# Altium footprint library PMP41115.PcbLib: 53 footprints (part 2 of 4)
Each footprint in its own frame and in the unit in brackets; x right, y up, seen from the top. Pads: shape width x height; smd on the part's side, far side on the other; paste and mask are expansions set on the pad; w line width, h text height; cw(c..) or ccw(c..) is an arc to the next point about the centre after c.
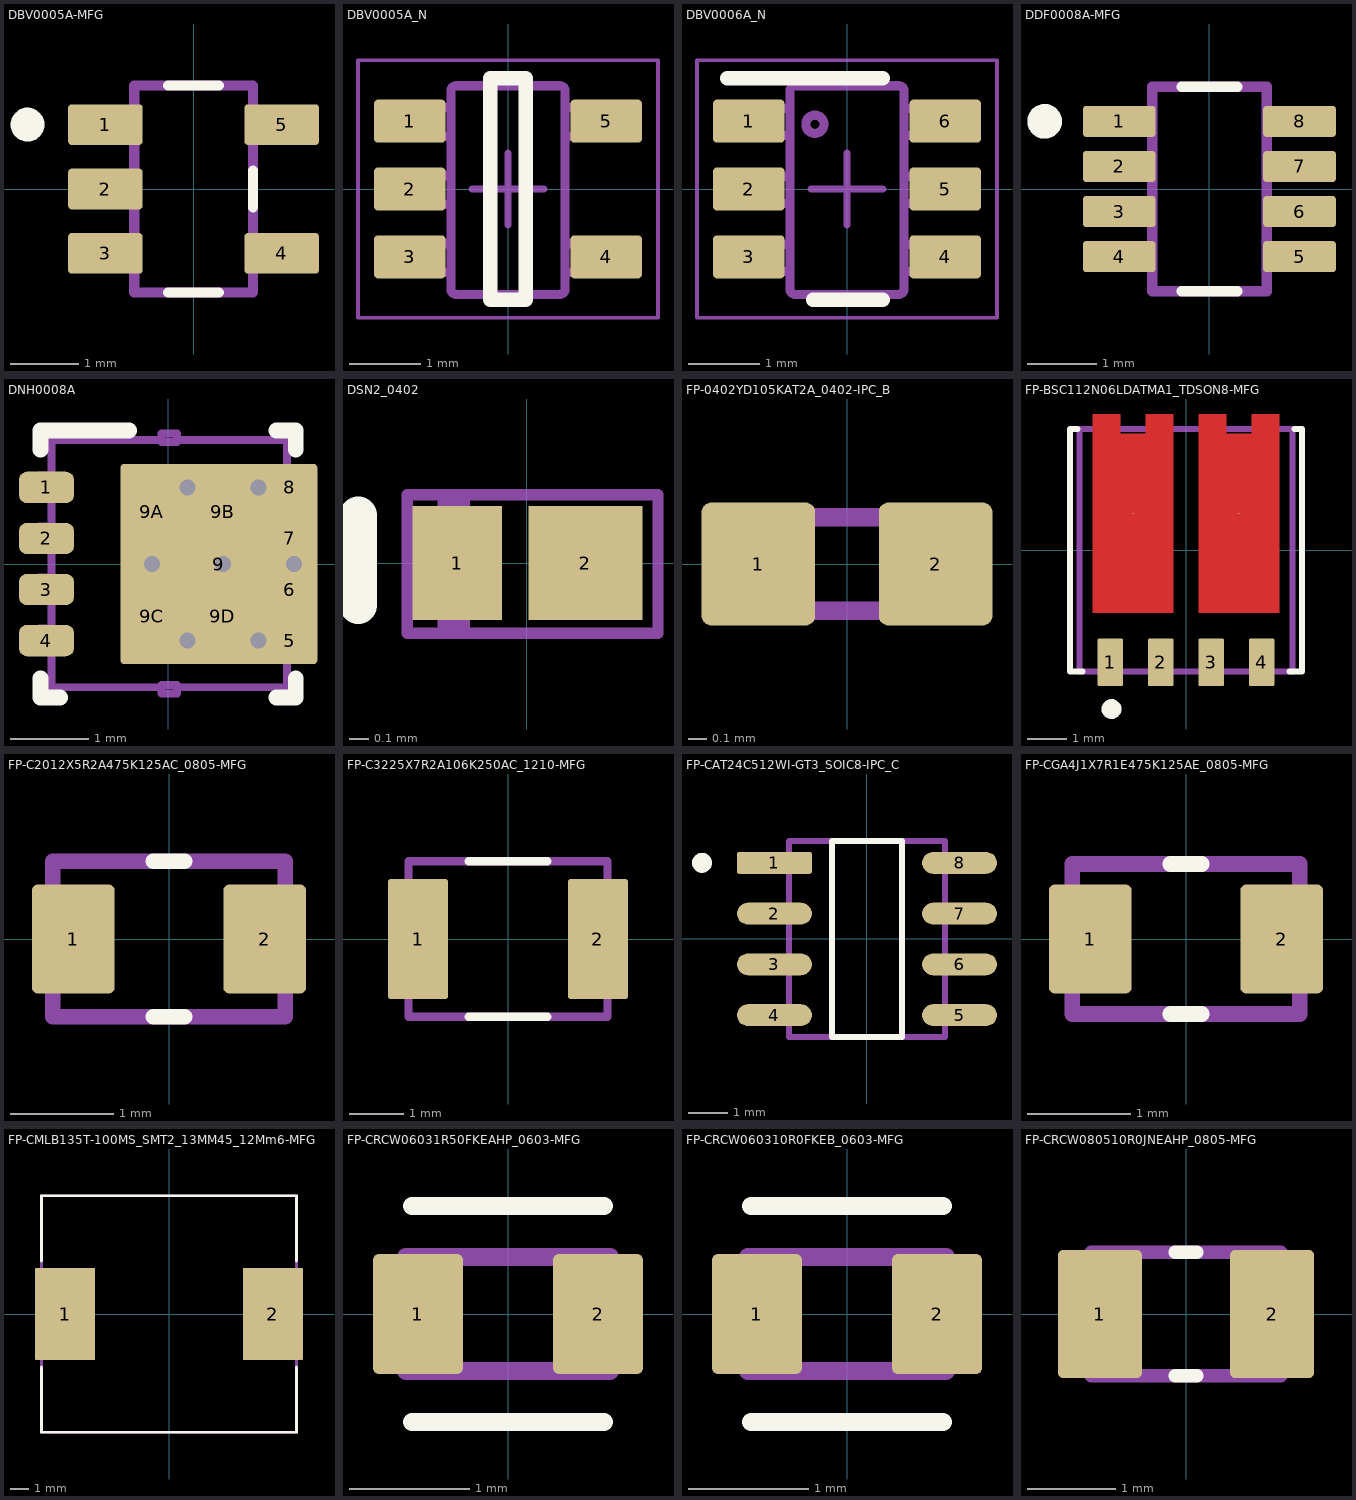
[diagram p1: the footprints below, top view; thin cyan lines are the x and y axes]

## DBV0005A-MFG [mm]
pads (5):
  rrect17% 1.1x0.6 smd paste+0 mask+0: 1(-1.3,0.95) 2(-1.3,0) 3(-1.3,-0.95) 4(1.3,-0.95) 5(1.3,0.95)
Top Overlay:
  circle w0.25: c-2.45,0.95 r0.125
  lines w0.15: -0.375,-1.525 0.375,-1.525 ; -0.375,1.525 0.375,1.525 ; 0.875,-0.275 0.875,0.275
Mechanical 5:
  lines w0.15: -0.875,-1.525 -0.875,1.525 0.875,1.525 0.875,-1.525 -0.875,-1.525
  text ".Designator" at 0.05,0.217 h0.5
3D body "IC_TPS7A2450DBVR_SOT23-5.STEP": height 0.25, standoff 0, extent -1.95,-1.775 1.95,1.775

## DBV0005A_N [mm] "SOT23, 5-Leads, Body 2.9x1.6mm, Pitch 0.95mm, Lead Span 2.8mm, IPC Medium Density"
height 1.45
pads (5):
  rrect17% 1x0.6 smd: 1(-1.375,0.95) 2(-1.375,0) 3(-1.375,-0.95) 4(1.375,-0.95) 5(1.375,0.95)
Top Overlay:
  lines w0.2: -0.25,-1.55 0.25,-1.55 0.25,1.55 -0.25,1.55 -0.25,-1.55
Mechanical 5:
  lines w0.127: -0.801,1.371 cw(c-0.725,1.37) -0.725,1.446 ; -0.801,1.37 -0.801,-1.399 -0.801,-1.4 ccw(c-0.725,-1.399) -0.725,-1.475 ; -0.801,1.37 -0.801,1.371 ; -0.725,-1.475 -0.725,-1.475 ; -0.725,-1.475 0.723,-1.475 0.724,-1.475 ccw(c0.723,-1.399) 0.799,-1.4 0.799,-1.399 0.799,1.37 ; -0.725,1.446 0.723,1.446 0.724,1.446 cw(c0.723,1.37) 0.799,1.371 ; -0.725,1.446 -0.725,1.446 ; 0.799,1.37 0.799,1.371 ; -1.423,-1.167 -1.199,-1.167 -1.105,-1.167 -1.088,-1.167 -0.835,-1.167 -0.801,-1.167 -0.801,-0.767 -0.835,-0.767 -1.088,-0.767 -1.105,-0.767 -1.199,-0.767 -1.423,-0.767 -1.423,-1.167 ; -1.423,-0.215 -1.199,-0.215 -1.105,-0.215 -1.088,-0.215 -0.835,-0.215 -0.801,-0.215 -0.801,0.186 -0.835,0.186 -1.088,0.186 -1.105,0.186 -1.199,0.186 -1.423,0.186 -1.423,-0.215 ; -1.423,0.738 -1.199,0.738 -1.105,0.738 -1.088,0.738 -0.835,0.738 -0.801,0.738 -0.801,1.138 -0.835,1.138 -1.088,1.138 -1.105,1.138 -1.199,1.138 -1.423,1.138 -1.423,0.738 ; 0.799,-1.167 0.799,-0.767 0.834,-0.767 1.087,-0.767 1.103,-0.767 1.198,-0.767 1.422,-0.767 1.422,-1.167 1.198,-1.167 1.103,-1.167 1.087,-1.167 0.834,-1.167 0.799,-1.167 ; 0.799,0.738 0.799,1.138 0.834,1.138 1.087,1.138 1.103,1.138 1.198,1.138 1.422,1.138 1.422,0.738 1.198,0.738 1.103,0.738 1.087,0.738 0.834,0.738 0.799,0.738
  text ".Designator" at -0.25,0.95 h0.51
Mechanical 15:
  lines w0.05: -2.1,-1.8 2.1,-1.8 2.1,1.8 -2.1,1.8 -2.1,-1.8
  lines w0.1: -0.5,0 0.5,0 ; 0,-0.5 0,0.5
3D body "DBV0005A.stp": height 1.09, standoff 0, extent -1.422,-1.461 1.423,1.46

## DBV0006A_N [mm] "SOT23, 6-Leads, Body 2.9x1.6mm, Pitch 0.95mm, Lead Span 2.8mm, IPC Medium Density"
height 1.45
pads (6):
  rrect17% 1x0.6 smd: 1(-1.375,0.95) 2(-1.375,0) 3(-1.375,-0.95) 4(1.375,-0.95) 5(1.375,0) 6(1.375,0.95)
Top Overlay:
  lines w0.2: -1.675,1.55 0.5,1.55 ; -0.475,-1.55 0.5,-1.55
Mechanical 5:
  lines w0.127: 0.724,-1.475 ccw(c0.723,-1.399) 0.8,-1.399 0.8,1.37 ccw(c0.723,1.37) 0.724,1.446 ; 0.723,-1.475 -0.724,-1.475 -0.725,-1.475 cw(c-0.724,-1.399) -0.801,-1.399 -0.801,1.37 cw(c-0.724,1.37) -0.725,1.446 -0.724,1.446 0.723,1.446 ; 0.723,-1.475 0.724,-1.475 ; 0.723,1.446 0.724,1.446 ; -1.423,-1.154 -1.423,-0.78 -1.206,-0.78 -1.113,-0.78 -1.081,-0.78 -0.828,-0.78 -0.801,-0.78 -0.801,-1.154 -0.828,-1.154 -1.081,-1.154 -1.113,-1.154 -1.206,-1.154 -1.423,-1.154 ; -1.423,-0.202 -1.423,0.173 -1.206,0.173 -1.113,0.173 -1.081,0.173 -0.828,0.173 -0.801,0.173 -0.801,-0.202 -0.828,-0.202 -1.081,-0.202 -1.113,-0.202 -1.206,-0.202 -1.423,-0.202 ; -1.423,0.751 -1.423,1.125 -1.206,1.125 -1.113,1.125 -1.081,1.125 -0.828,1.125 -0.801,1.125 -0.801,0.751 -0.828,0.751 -1.081,0.751 -1.113,0.751 -1.206,0.751 -1.423,0.751 ; -0.577,0.906 ccw(c-0.45,0.906) -0.323,0.906 ccw(c-0.45,0.906) -0.577,0.906 ; 0.8,-1.154 0.8,-0.78 0.827,-0.78 1.08,-0.78 1.112,-0.78 1.205,-0.78 1.422,-0.78 1.422,-1.154 1.205,-1.154 1.112,-1.154 1.08,-1.154 0.827,-1.154 0.8,-1.154 ; 0.8,-0.202 0.8,0.173 0.827,0.173 1.08,0.173 1.112,0.173 1.205,0.173 1.422,0.173 1.422,-0.202 1.205,-0.202 1.112,-0.202 1.08,-0.202 0.827,-0.202 0.8,-0.202 ; 0.8,0.751 0.8,1.125 0.827,1.125 1.08,1.125 1.112,1.125 1.205,1.125 1.422,1.125 1.422,0.751 1.205,0.751 1.112,0.751 1.08,0.751 0.827,0.751 0.8,0.751
  text ".Designator" at -0.075,0.925 h0.51
Mechanical 15:
  lines w0.05: -2.1,-1.8 -2.1,1.8 2.1,1.8 2.1,-1.8 -2.1,-1.8
  lines w0.1: -0.5,0 0.5,0 ; 0,-0.5 0,0.5
3D body "DBV0006A.stp": height 1.12, standoff 0, extent -1.422,-1.461 1.423,1.46

## DDF0008A-MFG [mm]
height 1.1
pads (8):
  rrect22% 1.05x0.45 smd paste+0 mask+0: 1(-1.3,0.975) 2(-1.3,0.325) 3(-1.3,-0.325) 4(-1.3,-0.975) 5(1.3,-0.975) 6(1.3,-0.325) 7(1.3,0.325) 8(1.3,0.975)
Top Overlay:
  circle w0.25: c-2.375,0.975 r0.125
  lines w0.15: -0.4,-1.475 0.4,-1.475 ; -0.4,1.475 0.4,1.475
Mechanical 5:
  lines w0.15: -0.825,-1.475 0.825,-1.475 0.825,1.475 -0.825,1.475 -0.825,-1.475
  text ".Designator" at 0,0 h0.5
3D body "IC_LM74502DDF_SOT23-8.STEP": height 0.25, standoff 0, extent -1.925,-1.725 1.925,1.725

## DNH0008A [mm] "VSONP-8"
height 0.9
pads (13):
  rrect50% 0.7x0.4 smd paste-0.05 mask-0.05: 1(-1.55,0.975) 2(-1.55,0.325) 3(-1.55,-0.325) 4(-1.55,-0.975) 5(1.55,-0.975) 6(1.55,-0.325) 7(1.55,0.325) 8(1.55,0.975)
  rrect4% 2.51x2.55 smd paste-1.5 mask-1.5: 9(0.645,0)
  rrect50% 0.705x1.125 on Top Paste: 9A(-0.208,0.662) 9B(0.697,0.662) 9C(-0.208,-0.663) 9D(0.697,-0.663)
via 0.245,0.975 diameter 0.5 hole 0.2
via 1.15,0.975 diameter 0.5 hole 0.2
via 1.15,-0.975 diameter 0.5 hole 0.2
via 0.245,-0.975 diameter 0.5 hole 0.2
via 0.697,0 diameter 0.5 hole 0.2
via -0.208,0 diameter 0.5 hole 0.2
via 1.602,0 diameter 0.5 hole 0.2
Top Overlay:
  lines w0.2: -1.625,-1.453 -1.625,-1.7 -1.378,-1.7 ; -1.625,1.453 -1.625,1.7 -0.5,1.7 ; 1.378,-1.7 1.625,-1.7 1.625,-1.453 ; 1.378,1.7 1.625,1.7 1.625,1.453
Top Solder:
  region: -0.56,-1.175 -0.56,-1.185 -0.552,-1.203 -0.538,-1.217 -0.52,-1.225 -0.51,-1.225 1.165,-1.225 1.175,-1.225 1.193,-1.217 1.207,-1.203 1.215,-1.185 1.215,-1.175 1.215,-1.125 1.8,-1.125 1.81,-1.125 1.828,-1.117 1.842,-1.103 1.85,-1.085 1.85,-1.075 1.85,-0.875 1.85,-0.865 1.842,-0.847 1.828,-0.833 1.81,-0.825 1.8,-0.825 1.215,-0.825 1.215,-0.475 1.8,-0.475 1.81,-0.475 1.828,-0.467 1.842,-0.453 1.85,-0.435 1.85,-0.425 1.85,-0.225 1.85,-0.215 1.842,-0.197 1.828,-0.183 1.81,-0.175 1.8,-0.175 1.215,-0.175 1.215,0.175 1.8,0.175 1.81,0.175 1.828,0.183 1.842,0.197 1.85,0.215 1.85,0.225 1.85,0.425 1.85,0.435 1.842,0.453 1.828,0.467 1.81,0.475 1.8,0.475 1.215,0.475 1.215,0.825 1.8,0.825 1.81,0.825 1.828,0.833 1.842,0.847 1.85,0.865 1.85,0.875 1.85,1.075 1.85,1.085 1.842,1.103 1.828,1.117 1.81,1.125 1.8,1.125 1.215,1.125 1.215,1.175 1.215,1.185 1.207,1.203 1.193,1.217 1.175,1.225 1.165,1.225 -0.51,1.225 -0.52,1.225 -0.538,1.217 -0.552,1.203 -0.56,1.185 -0.56,1.175
Mechanical 5:
  lines w0.1: -1.487,-1.119 -1.487,-1.569 -0.087,-1.569 ; -1.487,-0.819 -1.487,-0.469 ; -1.487,-0.169 -1.487,0.181 ; -1.487,0.481 -1.487,0.831 ; -1.487,1.131 -1.487,1.581 -0.087,1.581 ; 0.113,-1.569 1.513,-1.569 1.513,-1.119 ; 0.113,1.581 1.513,1.581 1.513,1.131 ; 1.513,-0.819 1.513,-0.469 ; 1.513,-0.169 1.513,0.181 ; 1.513,0.481 1.513,0.831 ; -1.637,-1.119 -1.637,-0.819 -1.461,-0.819 -1.461,-1.119 -1.637,-1.119 ; -1.637,-0.469 -1.637,-0.169 -1.461,-0.169 -1.461,-0.469 -1.637,-0.469 ; -1.637,0.181 -1.461,0.181 -1.461,0.481 -1.637,0.481 -1.637,0.181 ; -1.637,0.831 -1.637,1.131 -1.461,1.131 -1.461,0.831 -1.637,0.831 ; -0.087,-1.649 -0.087,-1.543 0.113,-1.543 0.113,-1.649 -0.087,-1.649 ; -0.087,1.554 0.113,1.554 0.113,1.661 -0.087,1.661 -0.087,1.554 ; 1.486,-1.119 1.486,-0.819 1.663,-0.819 1.663,-1.119 1.486,-1.119 ; 1.486,-0.469 1.486,-0.169 1.663,-0.169 1.663,-0.469 1.486,-0.469 ; 1.486,0.181 1.486,0.481 1.663,0.481 1.663,0.181 1.486,0.181 ; 1.486,0.831 1.486,1.131 1.663,1.131 1.663,0.831 1.486,0.831
  text ".Designator" at -0.725,-0.165 h0.38
3D body "DNH0008A.stp": height 0.91, standoff 0.01, extent -1.65,-1.655 1.65,1.655

## DSN2_0402 [mm] "ON SEMICONDUCTOR"
height 0.31
pads (2):
  rect 0.47x0.6 smd: 1(-0.367,0)
  rect 0.6x0.6 smd: 2(0.308,0)
Top Overlay:
  lines w0.2: -0.89,-0.22 -0.89,0.25
Mechanical 5:
  lines w0.06: -0.44,-0.36 -0.44,0.35 ; -0.38,-0.36 -0.38,0.35 ; -0.33,-0.36 -0.33,0.35 ; -0.63,-0.37 -0.63,0.36 0.69,0.36 0.69,-0.37 -0.63,-0.37
  text ".Designator" at -0.26,-0.13 h0.24
3D body: height 0.32, standoff 0.31, extent -0.349,-0.299 -0.221,0.299
3D body: height 0.31, standoff 0, extent -0.499,-0.299 0.499,0.299

## FP-0402YD105KAT2A_0402-IPC_B [mm]
height 4.8
pads (2):
  rrect16% 0.608x0.658 smd paste+0 mask+0: 1(-0.475,0) 2(0.475,0)
Mechanical 5:
  lines w0.1: -0.5,-0.25 0.5,-0.25 0.5,0.25 -0.5,0.25 -0.5,-0.25
  text ".Designator" at 0,0 h0.5
3D body "Cap_0402YD105KAT2A_0402.STEP": height 0.56, standoff 0, extent -0.5,-0.25 0.5,0.25

## FP-BSC112N06LDATMA1_TDSON8-MFG [mm]
pads (6):
  rrect15% 0.65x1.2 smd paste+0 mask+0: 1(-1.905,-2.825) 2(-0.635,-2.825) 3(0.635,-2.825) 4(1.905,-2.825)
  round 0.025 smd: 5-6(1.332,0.925) 7-8(-1.333,0.925)
Top Layer:
  region: 2.35,3.425 1.65,3.425 1.65,2.925 1.015,2.925 1.015,3.425 0.315,3.425 0.315,-1.575 2.35,-1.575
  region: -2.35,3.425 -1.65,3.425 -1.65,2.925 -1.015,2.925 -1.015,3.425 -0.315,3.425 -0.315,-1.575 -2.35,-1.575
Top Overlay:
  circle w0.25: c-1.875,-4 r0.125
  lines w0.15: -2.725,3.05 -2.925,3.05 -2.925,-3.05 -2.605,-3.05 ; 2.605,-3.05 2.925,-3.05 2.925,3.05 2.725,3.05
Mechanical 5:
  lines w0.15: -2.675,-3.05 2.675,-3.05 2.675,3.05 -2.675,3.05 -2.675,-3.05
  text ".Designator" at 0.05,0.217 h0.5
3D body "Trans_BSC112N06LDATMA1_TDSON8.STEP": height 0.25, standoff 0, extent -2.895,-3.525 2.895,3.525

## FP-C2012X5R2A475K125AC_0805-MFG [mm]
height 1
pads (2):
  rrect13% 0.8x1.05 smd paste+0 mask+0: 1(-0.925,0) 2(0.925,0)
Top Overlay:
  lines w0.15: -0.15,-0.75 0.15,-0.75 ; -0.15,0.75 0.15,0.75
Mechanical 5:
  lines w0.15: -1.125,-0.75 1.125,-0.75 1.125,0.75 -1.125,0.75 -1.125,-0.75
  text ".Designator" at 0.05,0.217 h0.5
3D body "Cap_C2012X5R2A475K125AC_0805.STEP": height 0.25, standoff 0, extent -1.425,-0.85 1.425,0.85

## FP-C3225X7R2A106K250AC_1210-MFG [mm]
height 4.8
pads (2):
  rrect9% 1.1x2.2 smd paste+0 mask+0: 1(-1.65,0) 2(1.65,0)
Top Overlay:
  lines w0.15: -0.725,-1.425 0.725,-1.425 ; -0.725,1.425 0.725,1.425
Mechanical 5:
  lines w0.15: -1.825,-1.425 1.825,-1.425 1.825,1.425 -1.825,1.425 -1.825,-1.425
  text ".Designator" at 0.05,0.217 h0.5
3D body "Cap_C3225X7R2A106K250AC_1210.STEP": height 2.85, standoff 0, extent -1.6,-1.25 1.6,1.25

## FP-CAT24C512WI-GT3_SOIC8-IPC_C [mm]
height 4.8
pads (8):
  rrect18% 1.874x0.545 smd paste+0 mask+0: 1(-2.316,1.905)
  rrect100% 1.874x0.545 smd paste+0 mask+0: 2(-2.316,0.635) 3(-2.316,-0.635) 4(-2.316,-1.905) 5(2.316,-1.905) 6(2.316,-0.635) 7(2.316,0.635) 8(2.316,1.905)
Top Overlay:
  circle w0.25: c-4.128,1.905 r0.125
  lines w0.15: -0.879,-2.45 0.879,-2.45 0.879,2.45 -0.879,2.45 -0.879,-2.45
Mechanical 5:
  lines w0.15: -1.95,-2.45 1.95,-2.45 1.95,2.45 -1.95,2.45 -1.95,-2.45
  text ".Designator" at 0.05,0.217 h0.5
3D body "IC_CAT24C512WI-GT3_SOIC8.STEP": height 0.25, standoff 0, extent -3.353,-2.55 3.353,2.55

## FP-CGA4J1X7R1E475K125AE_0805-MFG [mm]
height 4.8
pads (2):
  rrect13% 0.8x1.05 smd paste+0 mask+0: 1(-0.925,0) 2(0.925,0)
Top Overlay:
  lines w0.15: -0.15,-0.725 0.15,-0.725 ; -0.15,0.725 0.15,0.725
Mechanical 5:
  lines w0.15: -1.1,-0.725 1.1,-0.725 1.1,0.725 -1.1,0.725 -1.1,-0.725
  text ".Designator" at 0.05,0.217 h0.5
3D body "Cap_CGA4J1X7R1E475K125AE_0805.STEP": height 0.25, standoff 0, extent -1.425,-0.825 1.425,0.825

## FP-CMLB135T-100MS_SMT2_13MM45_12Mm6-MFG [mm]
height 4.8
pads (2):
  rrect3% 3.25x5 smd paste+0 mask+0: 1(-5.625,0) 2(5.625,0)
Top Overlay:
  lines w0.15: -6.9,-2.875 -6.9,-6.4 6.9,-6.4 6.9,-2.875 ; -6.9,2.875 -6.9,6.4 6.9,6.4 6.9,2.875
Mechanical 5:
  lines w0.15: -6.9,-6.4 -6.9,6.4 6.9,6.4 6.9,-6.4 -6.9,-6.4
  text ".Designator" at 0.05,0.217 h0.5
3D body "Ind_CMLB135T-100MS_SMT2_13MM45_12Mm6.STEP": height 0.25, standoff 0, extent -7.35,-6.5 7.35,6.5

## FP-CRCW06031R50FKEAHP_0603-MFG [mm]
height 1.1
pads (2):
  rrect13% 0.75x1 smd paste+0 mask+0: 1(-0.75,0) 2(0.75,0)
Top Overlay:
  lines w0.15: -0.8,-0.9 0.8,-0.9 ; -0.8,0.9 0.8,0.9
Mechanical 5:
  lines w0.15: -0.85,-0.475 -0.85,0.475 0.85,0.475 0.85,-0.475 -0.85,-0.475
  text ".Designator" at 0.05,0.217 h0.5
3D body "Res_CRCW06031R50FKEAHP_0603.STEP": height 0.25, standoff 0, extent -1.225,-0.6 1.225,0.6

## FP-CRCW060310R0FKEB_0603-MFG [mm]
height 4.8
pads (2):
  rrect13% 0.75x1 smd paste+0 mask+0: 1(-0.75,0) 2(0.75,0)
Top Overlay:
  lines w0.15: -0.8,-0.9 0.8,-0.9 ; -0.8,0.9 0.8,0.9
Mechanical 5:
  lines w0.15: -0.825,-0.475 0.825,-0.475 0.825,0.475 -0.825,0.475 -0.825,-0.475
  text ".Designator" at 0.05,0.217 h0.5
3D body "Res_CRCW060310R0FKEB_0603.STEP": height 0.25, standoff 0, extent -1.225,-0.6 1.225,0.6

## FP-CRCW080510R0JNEAHP_0805-MFG [mm]
height 4.8
pads (2):
  rrect11% 0.95x1.45 smd paste+0 mask+0: 1(-0.975,0) 2(0.975,0)
Top Overlay:
  lines w0.15: -0.125,-0.7 0.125,-0.7 ; -0.125,0.7 0.125,0.7
Mechanical 5:
  lines w0.15: -1.075,-0.7 1.075,-0.7 1.075,0.7 -1.075,0.7 -1.075,-0.7
  text ".Designator" at 0.05,0.217 h0.5
3D body "Res_CRCW080510R0JNEAHP_0805.STEP": height 0.25, standoff 0, extent -1.55,-0.825 1.55,0.825